# EAGLE library part BME688 (library card_samac_3d)
Gas sensor measuring relative humidity, barometric pressure, ambient temperature and gas (VOC) Source: Datasheet <https://www.bosch-sensortec.com/media/boschsensortec/downloads/datasheets/bst-bme688-ds000.pdf>
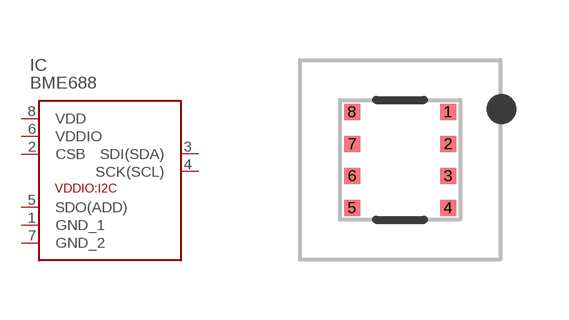
[diagram p3: symbol with the pads of BME688; footprint BME688]

Designator prefix IC

## BME688  [BME688]
1  GND_1
2  CSB
3  SDI(SDA)
4  SCK(SCL)
5  SDO(ADD)
6  VDDIO
7  GND_2
8  VDD

## Footprint BME688 (pad centres in mm)
BME688-8
smd 0.4 x 0.4: 1 1.2,1.2; 2 1.2,0.4; 3 1.2,-0.4; 4 1.2,-1.2; 5 -1.2,-1.2; 6 -1.2,-0.4; 7 -1.2,0.4; 8 -1.2,1.2